# Altium footprint library CI's.PcbLib: 14 footprints
Each footprint in its own frame and in the unit in brackets; x right, y up, seen from the top. Pads: shape width x height; smd on the part's side, far side on the other; paste and mask are expansions set on the pad; w line width, h text height; cw(c..) or ccw(c..) is an arc to the next point about the centre after c.
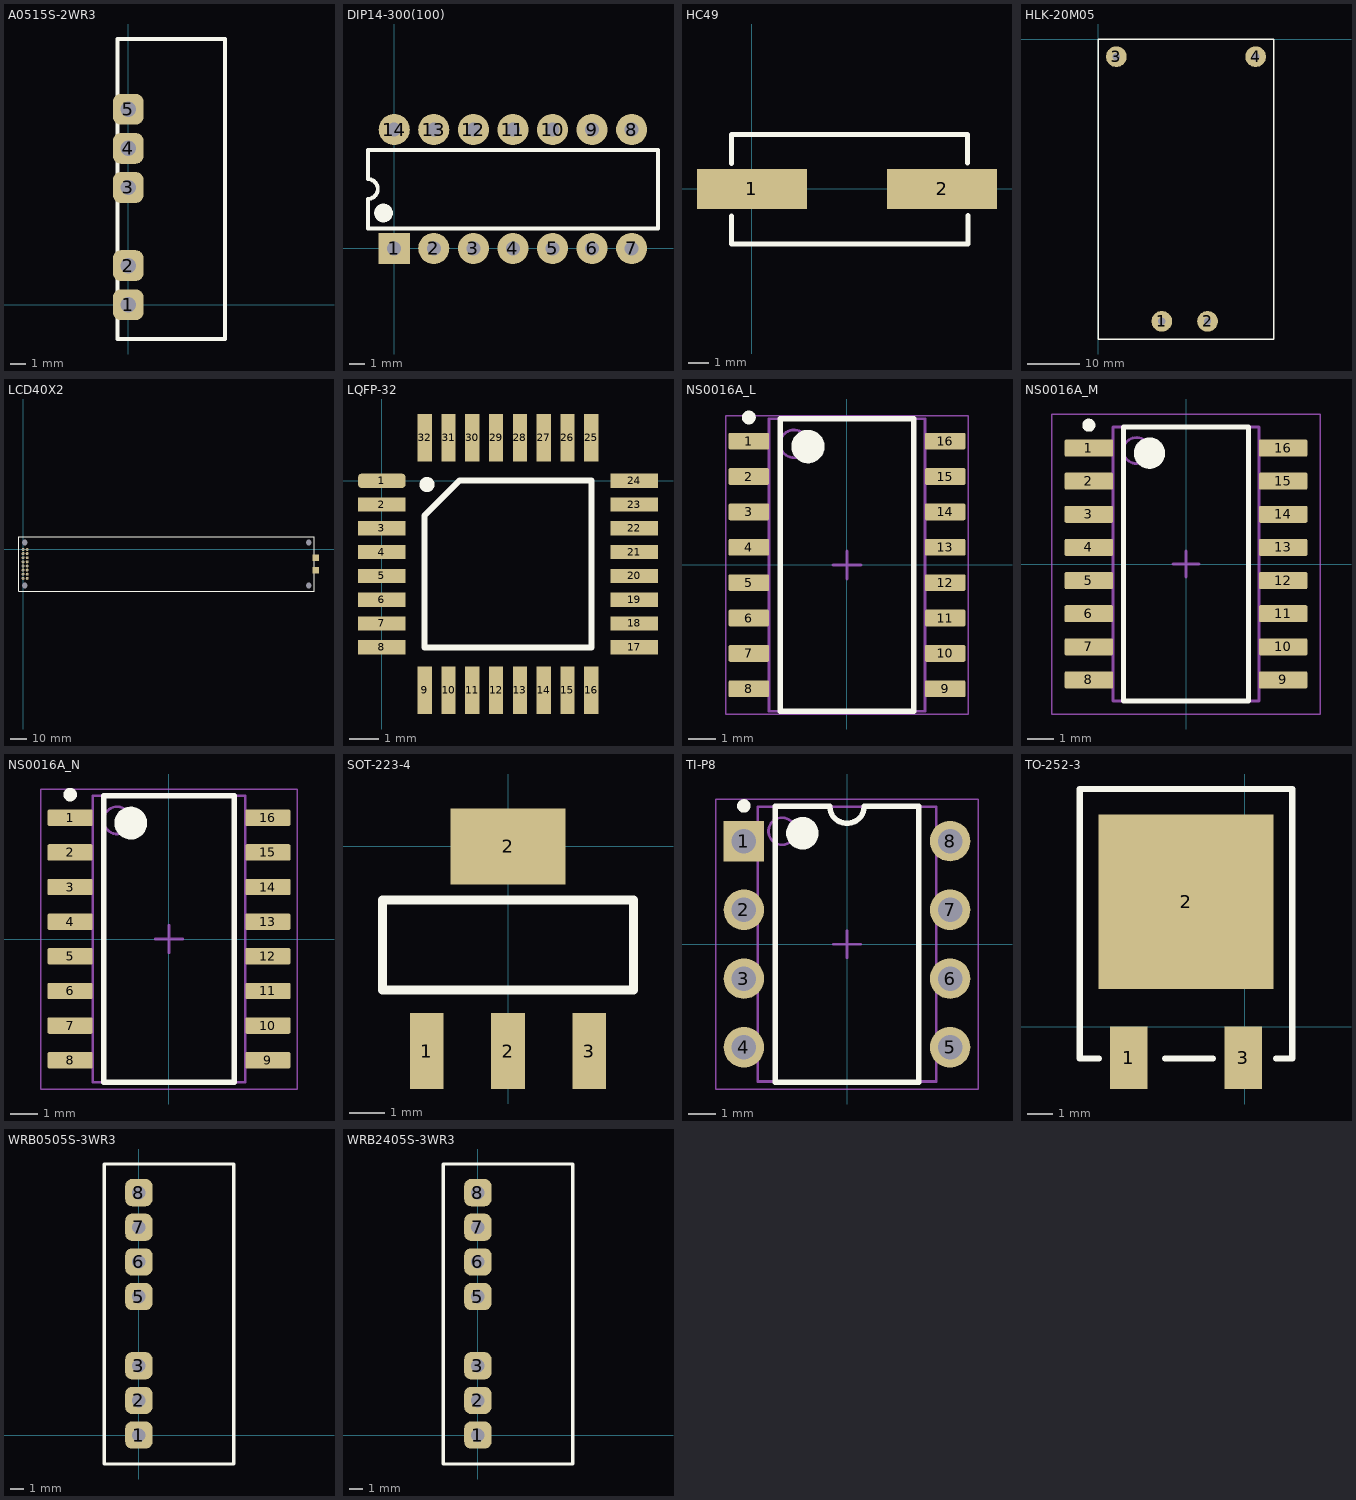
[diagram p0: the footprints below, top view; thin cyan lines are the x and y axes]

## A0515S-2WR3 [mm] "Isolator 5V +-15V"
pads (5):
  rrect50% 2x2 hole 1: 1(0,0) 2(0,2.54) 3(0,7.62) 4(0,10.16) 5(0,12.7)
Top Overlay:
  lines w0.254: -0.7,-2.23 -0.7,17.27 6.3,17.27 6.3,-2.23 -0.7,-2.23
3D body "A0515S-2WR3.STEP": height 10, standoff -4.1, extent -0.7,-2.225 6.3,17.275

## DIP14-300(100) [mm] "DIP, 14-Leads, Row Spacing 7.62mm, Pitch 2.54mm"
height 5.34
pads (14):
  rect 2x2 hole 0.9: 1(0,0)
  round 2 hole 0.9: 2(2.54,0) 3(5.08,0) 4(7.62,0) 5(10.16,0) 6(12.7,0) 7(15.24,0) 8(15.24,7.62) 9(12.7,7.62) 10(10.16,7.62) 11(7.62,7.62) 12(5.08,7.62) 13(2.54,7.62) 14(0,7.62)
Top Overlay:
  circle w0.6: c-0.69,2.27 r0.3
  lines w0.254: -1.69,1.27 16.93,1.27 16.93,6.325 -1.69,6.325 -1.69,4.445 cw(c-1.69,3.81) -1.69,3.175 -1.69,1.27
3D body "DIP14-300(100).STEP": height 4.3, standoff -3.79, extent -2.159,-0.094 17.241,7.747

## HC49 [mm] "Crystals 16.0MHz 13.4 x 4.9 x 4.3mm"
pads (2):
  rect 5.5x2 smd: 1(0,0) 2(9.5,0)
Top Overlay:
  lines w0.254: -1.025,-1.35 -1.025,-2.75 10.8,-2.75 10.8,-1.325 ; -1.025,1.275 -1.025,2.725 10.775,2.725 10.775,1.3
3D body "User Library-hc49_cystal.step": height 5.08, standoff 0, extent -1.825,-2.45 11.575,2.45

## HLK-20M05 [mm]
pads (4):
  round 4 hole 1.4: 1(12.2,-54.3) 2(21,-54.3) 3(3.45,-3.4) 4(30.25,-3.4)
Top Overlay:
  lines w0.254: 0,-57.7 0,0 33.7,0 33.7,-57.7 0,-57.7
3D body: height 23.5, standoff 0.1, extent 0,-57.5 33.5,0
3D body: height 0, standoff -4, extent 2.854,-3.999 3.85,-3.001
3D body: height 0, standoff -4, extent 30.004,-3.999 31,-3.001
3D body: height 0, standoff -4, extent 21.004,-54.999 22,-54.001
3D body: height 0, standoff -4, extent 11.504,-54.999 12.5,-54.001

## LCD40X2 [mm] "Winstar WH4002A"
pads (22):
  round 1.8 hole 1: 1(2.54,-17.78) 2(0,-17.78) 3(2.54,-15.24) 4(0,-15.24) 5(2.54,-12.7) 6(0,-12.7) 7(2.54,-10.16) 8(0,-10.16) 9(2.54,-7.62) 10(0,-7.62) 11(2.54,-5.08) 12(0,-5.08) 13(2.54,-2.54) 14(0,-2.54) 15(2.54,0) 16(0,0)
  round 1 hole 3.5: ""(1,-22.2) ""(1,4.3) ""(176,-22.2) ""(176,4.3)
  rect 4x4 smd: ""(180.34,-12.7) ""(180.34,-5.08)
Top Overlay:
  lines w0.254: -2.5,-25.7 -2.5,7.8 179.5,7.8 179.5,-25.7 -2.5,-25.7
3D body "LCD Display 4002.stp": height 13.61, standoff -0.03, extent -2.5,-25.825 179.5,7.675

## LQFP-32 [mm]
pads (32):
  rrect50% 1.6x0.48 smd: 1(0,0)
  rect 1.6x0.48 smd: 2(0,-0.8) 3(0,-1.6) 4(0,-2.4) 5(0,-3.2) 6(0,-4) 7(0,-4.8) 8(0,-5.6) 17(8.5,-5.6) 18(8.5,-4.8) 19(8.5,-4) 20(8.5,-3.2) 21(8.5,-2.4) 22(8.5,-1.6) 23(8.5,-0.8) 24(8.5,0)
  rect 0.48x1.6 smd: 9(1.45,-7.05) 10(2.25,-7.05) 11(3.05,-7.05) 12(3.85,-7.05) 13(4.65,-7.05) 14(5.45,-7.05) 15(6.25,-7.05) 16(7.05,-7.05) 25(7.05,1.45) 26(6.25,1.45) 27(5.45,1.45) 28(4.65,1.45) 29(3.85,1.45) 30(3.05,1.45) 31(2.25,1.45) 32(1.45,1.45)
Top Overlay:
  circle w0.254: c1.525,-0.125 r0.125
  lines w0.2: 1.435,-5.615 7.065,-5.615 7.065,0.015 2.62,0.015 1.435,-1.17 1.435,-5.615
3D body "User Library-LQFP32.STEP": height 1.63, standoff -0.09, extent -0.225,-7.325 8.775,1.675

## NS0016A_L [mm] "SOIC,16-Leads,Body 10.5x5.6mm,Pitch 1.27mm,IPC High Density"
height 2
pads (16):
  rrect17% 1.45x0.6 smd: 1(-3.525,4.445) 2(-3.525,3.175) 3(-3.525,1.905) 4(-3.525,0.635) 5(-3.525,-0.635) 6(-3.525,-1.905) 7(-3.525,-3.175) 8(-3.525,-4.445) 9(3.525,-4.445) 10(3.525,-3.175) 11(3.525,-1.905) 12(3.525,-0.635) 13(3.525,0.635) 14(3.525,1.905) 15(3.525,3.175) 16(3.525,4.445)
Top Overlay:
  circle w0.25: c-3.525,5.295 r0.125
  circle w0.6: c-1.4,4.25 r0.3
  lines w0.2: -2.4,-5.25 -2.4,5.25 2.4,5.25 2.4,-5.25 -2.4,-5.25
Mechanical 1:
  text ".Designator" at -1.524,-0.508 h1.02
Mechanical 13:
  circle w0.1: c-1.9,4.35 r0.5
  lines w0.1: -2.8,-5.25 -2.8,5.25 2.8,5.25 2.8,-5.25 -2.8,-5.25
Mechanical 15:
  lines w0.05: -4.35,-5.35 -4.35,5.35 4.35,5.35 4.35,-5.35 -4.35,-5.35
  lines w0.1: -0.5,0 0.5,0 ; 0,-0.5 0,0.5
3D body: height 2, standoff 0.05, extent -2.8,-5.25 2.8,5.25

## NS0016A_M [mm] "SOIC,16-Leads,Body 10.5x5.6mm,Pitch 1.27mm,IPC Low Density"
height 2
pads (16):
  rrect15% 1.85x0.65 smd: 1(-3.725,4.445) 2(-3.725,3.175) 3(-3.725,1.905) 4(-3.725,0.635) 5(-3.725,-0.635) 6(-3.725,-1.905) 7(-3.725,-3.175) 8(-3.725,-4.445) 9(3.725,-4.445) 10(3.725,-3.175) 11(3.725,-1.905) 12(3.725,-0.635) 13(3.725,0.635) 14(3.725,1.905) 15(3.725,3.175) 16(3.725,4.445)
Top Overlay:
  circle w0.6: c-1.4,4.25 r0.3
  circle w0.25: c-3.725,5.32 r0.125
  lines w0.2: -2.4,-5.25 2.4,-5.25 2.4,5.25 -2.4,5.25 -2.4,-5.25
Mechanical 1:
  text ".Designator" at -1.524,-0.508 h1.02
Mechanical 13:
  circle w0.1: c-1.9,4.35 r0.5
  lines w0.1: -2.8,-5.25 2.8,-5.25 2.8,5.25 -2.8,5.25 -2.8,-5.25
Mechanical 15:
  lines w0.05: -5.15,-5.75 5.15,-5.75 5.15,5.75 -5.15,5.75 -5.15,-5.75
  lines w0.1: -0.5,0 0.5,0 ; 0,-0.5 0,0.5
3D body: height 2, standoff 0.05, extent -2.8,-5.25 2.8,5.25

## NS0016A_N [mm] "SOIC,16-Leads,Body 10.5x5.6mm,Pitch 1.27mm,IPC Medium Density"
height 2
pads (16):
  rrect17% 1.65x0.6 smd: 1(-3.625,4.445) 2(-3.625,3.175) 3(-3.625,1.905) 4(-3.625,0.635) 5(-3.625,-0.635) 6(-3.625,-1.905) 7(-3.625,-3.175) 8(-3.625,-4.445) 9(3.625,-4.445) 10(3.625,-3.175) 11(3.625,-1.905) 12(3.625,-0.635) 13(3.625,0.635) 14(3.625,1.905) 15(3.625,3.175) 16(3.625,4.445)
Top Overlay:
  circle w0.6: c-1.4,4.25 r0.3
  circle w0.25: c-3.625,5.295 r0.125
  lines w0.2: -2.4,-5.25 2.4,-5.25 2.4,5.25 -2.4,5.25 -2.4,-5.25
Mechanical 1:
  text ".Designator" at -1.524,-0.508 h1.02
Mechanical 13:
  circle w0.1: c-1.9,4.35 r0.5
  lines w0.1: -2.8,-5.25 2.8,-5.25 2.8,5.25 -2.8,5.25 -2.8,-5.25
Mechanical 15:
  lines w0.05: -4.7,-5.5 4.7,-5.5 4.7,5.5 -4.7,5.5 -4.7,-5.5
  lines w0.1: -0.5,0 0.5,0 ; 0,-0.5 0,0.5
3D body: height 2, standoff 0.05, extent -2.8,-5.25 2.8,5.25

## SOT-223-4 [mm]
pads (4):
  rect 0.95x2.15 smd: 1(-2.3,-5.8) 2(0,-5.8) 3(2.3,-5.8)
  rect 3.25x2.15 smd: 2(0,0)
Top Overlay:
  lines w0.254: -3.556,-4.064 -3.556,-1.524 3.556,-1.524 3.556,-4.064 -3.556,-4.064
3D body "User Library-SOT-223-1.step": height 1.69, standoff 0.04, extent -3.25,-6.548 3.25,0.452

## TI-P8 [mm] "DIP, 8-Leads, Body 9.59x6.35mm, Pitch 2.54mm"
height 5.08
pads (8):
  rect 1.5x1.5 hole 0.9: 1(-3.81,3.81)
  round 1.5 hole 0.9: 2(-3.81,1.27) 3(-3.81,-1.27) 4(-3.81,-3.81) 5(3.81,-3.81) 6(3.81,-1.27) 7(3.81,1.27) 8(3.81,3.81)
Top Overlay:
  circle w0.6: c-1.65,4.1 r0.3
  circle w0.25: c-3.81,5.11 r0.125
  lines w0.2: -2.65,-5.1 2.65,-5.1 2.65,5.1 0.635,5.1 cw(c0,5.1) -0.635,5.1 -2.65,5.1 -2.65,-5.1
Mechanical 13:
  circle w0.1: c-2.4,4.175 r0.5
  lines w0.1: -3.3,-5.075 3.3,-5.075 3.3,5.075 -3.3,5.075 -3.3,-5.075
Mechanical 15:
  lines w0.05: -4.85,-5.35 4.85,-5.35 4.85,5.35 -4.85,5.35 -4.85,-5.35
  lines w0.1: -0.5,0 0.5,0 ; 0,-0.5 0,0.5
3D body: height 5.08, standoff 0.51, extent -3.3,-5.075 3.3,5.075
3D body: height 0, standoff -1.6, extent 3.675,3.45 3.945,4.17
3D body: height 2.93, standoff 2.66, extent 3.3,3.31 3.945,4.31
3D body: height 2.66, standoff 0, extent 3.675,3.31 3.945,4.31
3D body: height 0, standoff -1.6, extent 3.675,0.91 3.945,1.63
3D body: height 2.93, standoff 2.66, extent 3.3,0.77 3.945,1.77
3D body: height 2.66, standoff 0, extent 3.675,0.77 3.945,1.77
3D body: height 0, standoff -1.6, extent 3.675,-1.63 3.945,-0.91
3D body: height 2.93, standoff 2.66, extent 3.3,-1.77 3.945,-0.77
3D body: height 2.66, standoff 0, extent 3.675,-1.77 3.945,-0.77
3D body: height 0, standoff -1.6, extent 3.675,-4.17 3.945,-3.45
3D body: height 2.93, standoff 2.66, extent 3.3,-4.31 3.945,-3.31
3D body: height 2.66, standoff 0, extent 3.675,-4.31 3.945,-3.31
3D body: height 0, standoff -1.6, extent -3.945,-4.17 -3.675,-3.45
3D body: height 2.93, standoff 2.66, extent -3.945,-4.31 -3.3,-3.31
3D body: height 2.66, standoff 0, extent -3.945,-4.31 -3.675,-3.31
3D body: height 0, standoff -1.6, extent -3.945,-1.63 -3.675,-0.91
3D body: height 2.93, standoff 2.66, extent -3.945,-1.77 -3.3,-0.77
3D body: height 2.66, standoff 0, extent -3.945,-1.77 -3.675,-0.77
3D body: height 0, standoff -1.6, extent -3.945,0.91 -3.675,1.63
3D body: height 2.93, standoff 2.66, extent -3.945,0.77 -3.3,1.77
3D body: height 2.66, standoff 0, extent -3.945,0.77 -3.675,1.77
3D body: height 0, standoff -1.6, extent -3.945,3.45 -3.675,4.17
3D body: height 2.93, standoff 2.66, extent -3.945,3.31 -3.3,4.31
3D body: height 2.66, standoff 0, extent -3.945,3.31 -3.675,4.31

## TO-252-3 [mm]
pads (3):
  rect 1.5x2.5 smd: 1(-4.648,-1.245) 3(-0.048,-1.245)
  rect 7x7 smd: 2(-2.348,5.005)
Top Overlay:
  lines w0.254: -5.842,-1.27 -6.604,-1.27 -6.604,9.525 1.905,9.525 1.905,-1.27 1.27,-1.27 ; -3.175,-1.27 -1.27,-1.27
3D body "User Library-DPAK_TO-252AA.step": height 2.37, standoff -0.03, extent -5.729,-1.933 1.005,8.168

## WRB0505S-3WR3 [mm]
pads (7):
  rrect50% 2x2 hole 1: 1(0,0) 2(0,2.54) 3(0,5.08) 5(0,10.16) 6(0,12.7) 7(0,15.24) 8(0,17.78)
Top Overlay:
  lines w0.254: -2.54,-2.12 6.96,-2.12 6.96,19.88 -2.54,19.88 -2.54,-2.12
3D body "WRB0505S-3WR3.STEP": height 12.5, standoff -4.1, extent -2.5,-2.225 7,19.775

## WRB2405S-3WR3 [mm]
pads (7):
  rrect50% 2x2 hole 1: 1(0,0) 2(0,2.54) 3(0,5.08) 5(0,10.16) 6(0,12.7) 7(0,15.24) 8(0,17.78)
Top Overlay:
  lines w0.254: -2.54,-2.12 -2.54,19.88 6.96,19.88 6.96,-2.12 -2.54,-2.12
3D body "WRB2405S-3WR3.STEP": height 12.5, standoff -4.1, extent -2.5,-2.225 7,19.775